# Altium integrated library WS2812C-2020.IntLib: 1 symbol
Pins are listed as number, name and electrical type; pins without a type are passive.

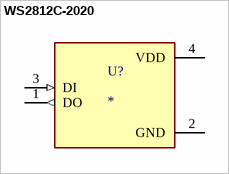
[diagram p0: symbol WS2812C-2020]

## WS2812C-2020
designator U?
Intelligent control LED integrated light source; MF: Worldsemi; MP: WS2812C-2020; SnapEDA_Link: https://www.snapeda.com/parts/WS2812C-2020/Worldsemi/view-part/?ref=snap; Package: Package; Value: *; Check_prices: https://www.snapeda.com/parts/WS2812C-2020/Worldsemi/view-part/?ref=eda
footprint LED_WS2812C-2020
pins: 1 DO (out), 2 GND (power), 3 DI (in), 4 VDD (power)